# Altium footprint library NanoD1.PcbLib: 5 footprints
Each footprint in its own frame and in the unit in brackets; x right, y up, seen from the top. Pads: shape width x height; smd on the part's side, far side on the other; paste and mask are expansions set on the pad; w line width, h text height; cw(c..) or ccw(c..) is an arc to the next point about the centre after c.
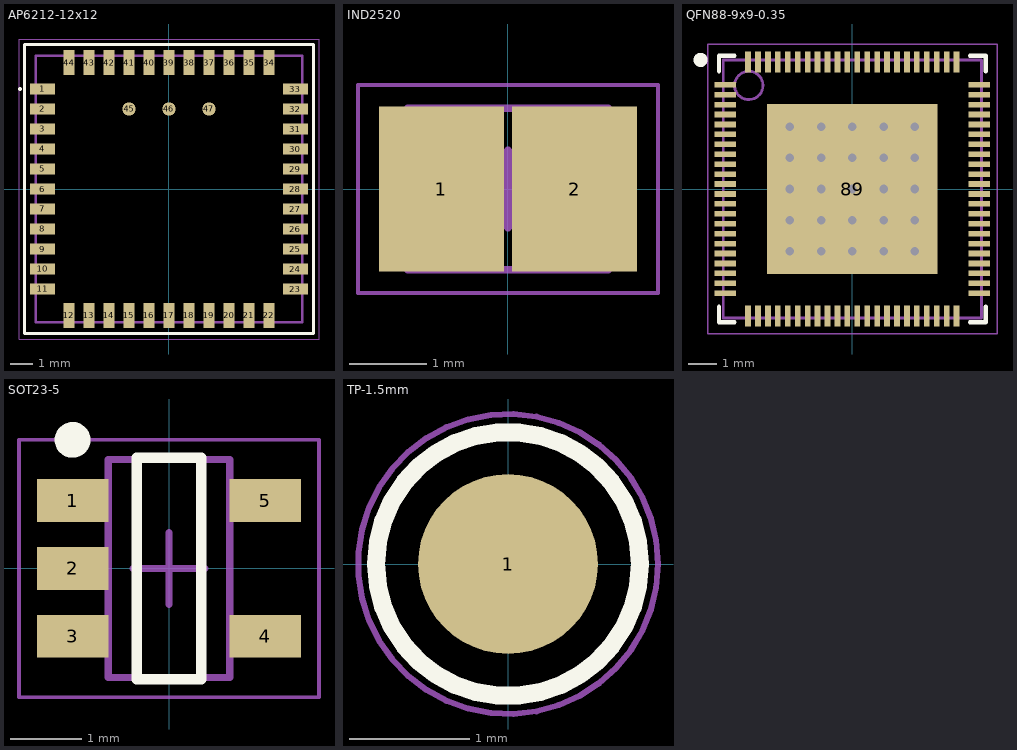
[diagram p0: the footprints below, top view; thin cyan lines are the x and y axes]

## AP6212-12x12 [mm]
pads (47):
  rect 1.125x0.5 smd: 1(-5.687,4.5) 2(-5.687,3.6) 3(-5.687,2.7) 4(-5.687,1.8) 5(-5.687,0.9) 6(-5.687,0) 7(-5.687,-0.9) 8(-5.687,-1.8) 9(-5.687,-2.7) 10(-5.687,-3.6) 11(-5.687,-4.5) 23(5.687,-4.5) 24(5.687,-3.6) 25(5.687,-2.7) 26(5.687,-1.8) 27(5.687,-0.9) 28(5.687,0) 29(5.687,0.9) 30(5.687,1.8) 31(5.687,2.7) 32(5.687,3.6) 33(5.687,4.5)
  rect 0.5x1.125 smd: 12(-4.5,-5.687) 13(-3.6,-5.687) 14(-2.7,-5.687) 15(-1.8,-5.687) 16(-0.9,-5.687) 17(0,-5.687) 18(0.9,-5.687) 19(1.8,-5.687) 20(2.7,-5.687) 21(3.6,-5.687) 22(4.5,-5.687) 34(4.5,5.687) 35(3.6,5.687) 36(2.7,5.687) 37(1.8,5.687) 38(0.9,5.687) 39(0,5.687) 40(-0.9,5.687) 41(-1.8,5.687) 42(-2.7,5.687) 43(-3.6,5.687) 44(-4.5,5.687)
  round 0.6 smd: 45(-1.8,3.6) 46(0,3.6) 47(1.8,3.6)
Top Overlay:
  circle w0.15: c-6.7,4.5 r0.01
  lines w0.15: -6.5,-6.5 -6.5,6.5 6.5,6.5 6.5,-6.5 -6.5,-6.5
Mechanical 13:
  lines w0.1: -6,-6 -6,6 6,6 6,-6 -6,-6
Mechanical 15:
  lines w0.05: -6.75,-6.75 6.75,-6.75 6.75,6.75 -6.75,6.75 -6.75,-6.75

## IND2520 [mm] "Chip Inductor, 2-Leads, Body 2.50x2.00mm, IPC Medium Density"
height 0.6
pads (2):
  rect 1.63x2.14 smd: 1(-0.865,0) 2(0.865,0)
Mechanical 13:
  lines w0.1: -1.3,-1.05 1.3,-1.05 1.3,1.05 -1.3,1.05 -1.3,-1.05
Mechanical 15:
  lines w0.05: -1.95,-1.35 1.95,-1.35 1.95,1.35 -1.95,1.35 -1.95,-1.35
  lines w0.1: -0.5,0 0.5,0 ; 0,-0.5 0,0.5
3D body "IND2520.step": height 0.6, standoff 0, extent -1.3,-1.05 1.3,1.05

## QFN88-9x9-0.35 [mm] "QFN, 88-Leads, Body 9.00x9.00mm, Pitch 0.35mm, Thermal Pad 6.00x6.00mm, IPC Medium Density"
height 0.9
pads (89):
  rect 0.75x0.2 smd: 1(-4.475,3.675) 2(-4.475,3.325) 3(-4.475,2.975) 4(-4.475,2.625) 5(-4.475,2.275) 6(-4.475,1.925) 7(-4.475,1.575) 8(-4.475,1.225) 9(-4.475,0.875) 10(-4.475,0.525) 11(-4.475,0.175) 12(-4.475,-0.175) 13(-4.475,-0.525) 14(-4.475,-0.875) 15(-4.475,-1.225) 16(-4.475,-1.575) 17(-4.475,-1.925) 18(-4.475,-2.275) 19(-4.475,-2.625) 20(-4.475,-2.975) 21(-4.475,-3.325) 22(-4.475,-3.675) 45(4.475,-3.675) 46(4.475,-3.325) 47(4.475,-2.975) 48(4.475,-2.625) 49(4.475,-2.275) 50(4.475,-1.925) 51(4.475,-1.575) 52(4.475,-1.225) 53(4.475,-0.875) 54(4.475,-0.525) 55(4.475,-0.175) 56(4.475,0.175) 57(4.475,0.525) 58(4.475,0.875) 59(4.475,1.225) 60(4.475,1.575) 61(4.475,1.925) 62(4.475,2.275) 63(4.475,2.625) 64(4.475,2.975) 65(4.475,3.325) 66(4.475,3.675)
  rect 0.2x0.75 smd: 23(-3.675,-4.475) 24(-3.325,-4.475) 25(-2.975,-4.475) 26(-2.625,-4.475) 27(-2.275,-4.475) 28(-1.925,-4.475) 29(-1.575,-4.475) 30(-1.225,-4.475) 31(-0.875,-4.475) 32(-0.525,-4.475) 33(-0.175,-4.475) 34(0.175,-4.475) 35(0.525,-4.475) 36(0.875,-4.475) 37(1.225,-4.475) 38(1.575,-4.475) 39(1.925,-4.475) 40(2.275,-4.475) 41(2.625,-4.475) 42(2.975,-4.475) 43(3.325,-4.475) 44(3.675,-4.475) 67(3.675,4.475) 68(3.325,4.475) 69(2.975,4.475) 70(2.625,4.475) 71(2.275,4.475) 72(1.925,4.475) 73(1.575,4.475) 74(1.225,4.475) 75(0.875,4.475) 76(0.525,4.475) 77(0.175,4.475) 78(-0.175,4.475) 79(-0.525,4.475) 80(-0.875,4.475) 81(-1.225,4.475) 82(-1.575,4.475) 83(-1.925,4.475) 84(-2.275,4.475) 85(-2.625,4.475) 86(-2.975,4.475) 87(-3.325,4.475) 88(-3.675,4.475)
  rect 6x6 smd: 89(0,0)
via -2.2,2.2 diameter 0.6 hole 0.3
via -1.1,2.2 diameter 0.6 hole 0.3
via 0,2.2 diameter 0.6 hole 0.3
via 1.1,2.2 diameter 0.6 hole 0.3
via 2.2,2.2 diameter 0.6 hole 0.3
via -2.2,1.1 diameter 0.6 hole 0.3
via -1.1,1.1 diameter 0.6 hole 0.3
via 0,1.1 diameter 0.6 hole 0.3
via 1.1,1.1 diameter 0.6 hole 0.3
via 2.2,1.1 diameter 0.6 hole 0.3
via -2.2,0 diameter 0.6 hole 0.3
via -1.1,0 diameter 0.6 hole 0.3
via 0,0 diameter 0.6 hole 0.3
via 1.1,0 diameter 0.6 hole 0.3
via 2.2,0 diameter 0.6 hole 0.3
via -2.2,-1.1 diameter 0.6 hole 0.3
via -1.1,-1.1 diameter 0.6 hole 0.3
via 0,-1.1 diameter 0.6 hole 0.3
via 1.1,-1.1 diameter 0.6 hole 0.3
via 2.2,-1.1 diameter 0.6 hole 0.3
via -2.2,-2.2 diameter 0.6 hole 0.3
via -1.1,-2.2 diameter 0.6 hole 0.3
via 0,-2.2 diameter 0.6 hole 0.3
via 1.1,-2.2 diameter 0.6 hole 0.3
via 2.2,-2.2 diameter 0.6 hole 0.3
Top Overlay:
  circle w0.25: c-5.35,4.55 r0.125
  lines w0.15: -4.7,-4.15 -4.7,-4.7 -4.15,-4.7 ; -4.7,4.15 -4.7,4.7 -4.15,4.7 ; 4.15,-4.7 4.7,-4.7 4.7,-4.15 ; 4.15,4.7 4.7,4.7 4.7,4.15
Mechanical 13:
  circle w0.1: c-3.65,3.65 r0.5
  lines w0.1: -4.55,-4.55 -4.55,4.55 4.55,4.55 4.55,-4.55 -4.55,-4.55
Mechanical 15:
  lines w0.05: -5.1,-5.1 -5.1,5.1 5.1,5.1 5.1,-5.1 -5.1,-5.1
  lines w0.1: -0.5,0 0.5,0 ; 0,-0.5 0,0.5
3D body "QFN88-9x9-0.35.step": height 0.9, standoff 0, extent -4.551,-4.551 4.551,4.551

## SOT23-5 [mm] "SOT23, 5-Leads, Body 2.95x2.80mm, Pitch 0.95mm, IPC Medium Density"
height 1.25
pads (5):
  rect 1x0.6 smd: 1(-1.35,0.95) 2(-1.35,0) 3(-1.35,-0.95) 4(1.35,-0.95) 5(1.35,0.95)
Top Overlay:
  circle w0.25: c-1.35,1.8 r0.125
  lines w0.15: -0.45,-1.55 0.45,-1.55 0.45,1.55 -0.45,1.55 -0.45,-1.55
Mechanical 13:
  lines w0.1: -0.85,-1.525 -0.85,1.525 0.85,1.525 0.85,-1.525 -0.85,-1.525
Mechanical 15:
  lines w0.05: -2.1,-1.8 -2.1,1.8 2.1,1.8 2.1,-1.8 -2.1,-1.8
  lines w0.1: -0.5,0 0.5,0 ; 0,-0.5 0,0.5
3D body "SOT23-5.step": height 1.25, standoff 0, extent -1.475,-1.525 1.475,1.525

## TP-1.5mm [mm]
pads (1):
  round 1.5 smd: 1(0,0)
Top Overlay:
  circle w0.15: c0,0 r1.1
Mechanical 15:
  circle w0.05: c0,0 r1.25